# Altium footprint library 1206_CAPACITOR_PACKAGE.PcbLib: 1 footprints
Each footprint in its own frame and in the unit in brackets; x right, y up, seen from the top. Pads: shape width x height; smd on the part's side, far side on the other; paste and mask are expansions set on the pad; w line width, h text height; cw(c..) or ccw(c..) is an arc to the next point about the centre after c.
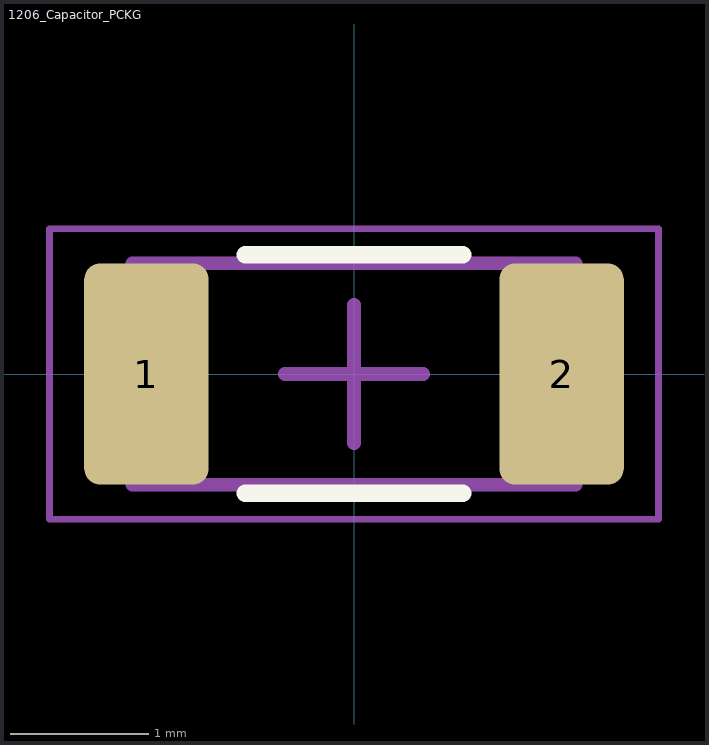
[diagram p0: the footprint, top view; thin cyan lines are the x and y axes]

## 1206_Capacitor_PCKG [mm]
height 0.55
pads (2):
  rrect25% 0.9x1.6 smd: 1(-1.5,0) 2(1.5,0)
Top Overlay:
  lines w0.127: -0.786,-0.863 0.787,-0.863 ; -0.786,0.864 0.787,0.864
Mechanical 13:
  lines w0.1: -1.6,-0.8 -1.6,0.8 1.6,0.8 1.6,-0.8 -1.6,-0.8
Mechanical 15:
  lines w0.05: -2.2,-1.05 -2.2,1.05 2.2,1.05 2.2,-1.05 -2.2,-1.05
  lines w0.1: -0.5,0 0.5,0 ; 0,-0.5 0,0.5
3D body: height 0.55, standoff 0, extent -1.05,-0.8 1.05,0.8
3D body: height 0.55, standoff 0, extent -1.6,-0.8 -1.05,0.8
3D body: height 0.55, standoff 0, extent 1.05,-0.8 1.6,0.8